# Altium footprint library ESP32-S31 CB V1.1.PcbLib: 28 footprints (part 1 of 2)
Each footprint in its own frame and in the unit in brackets; x right, y up, seen from the top. Pads: shape width x height; smd on the part's side, far side on the other; paste and mask are expansions set on the pad; w line width, h text height; cw(c..) or ccw(c..) is an arc to the next point about the centre after c.
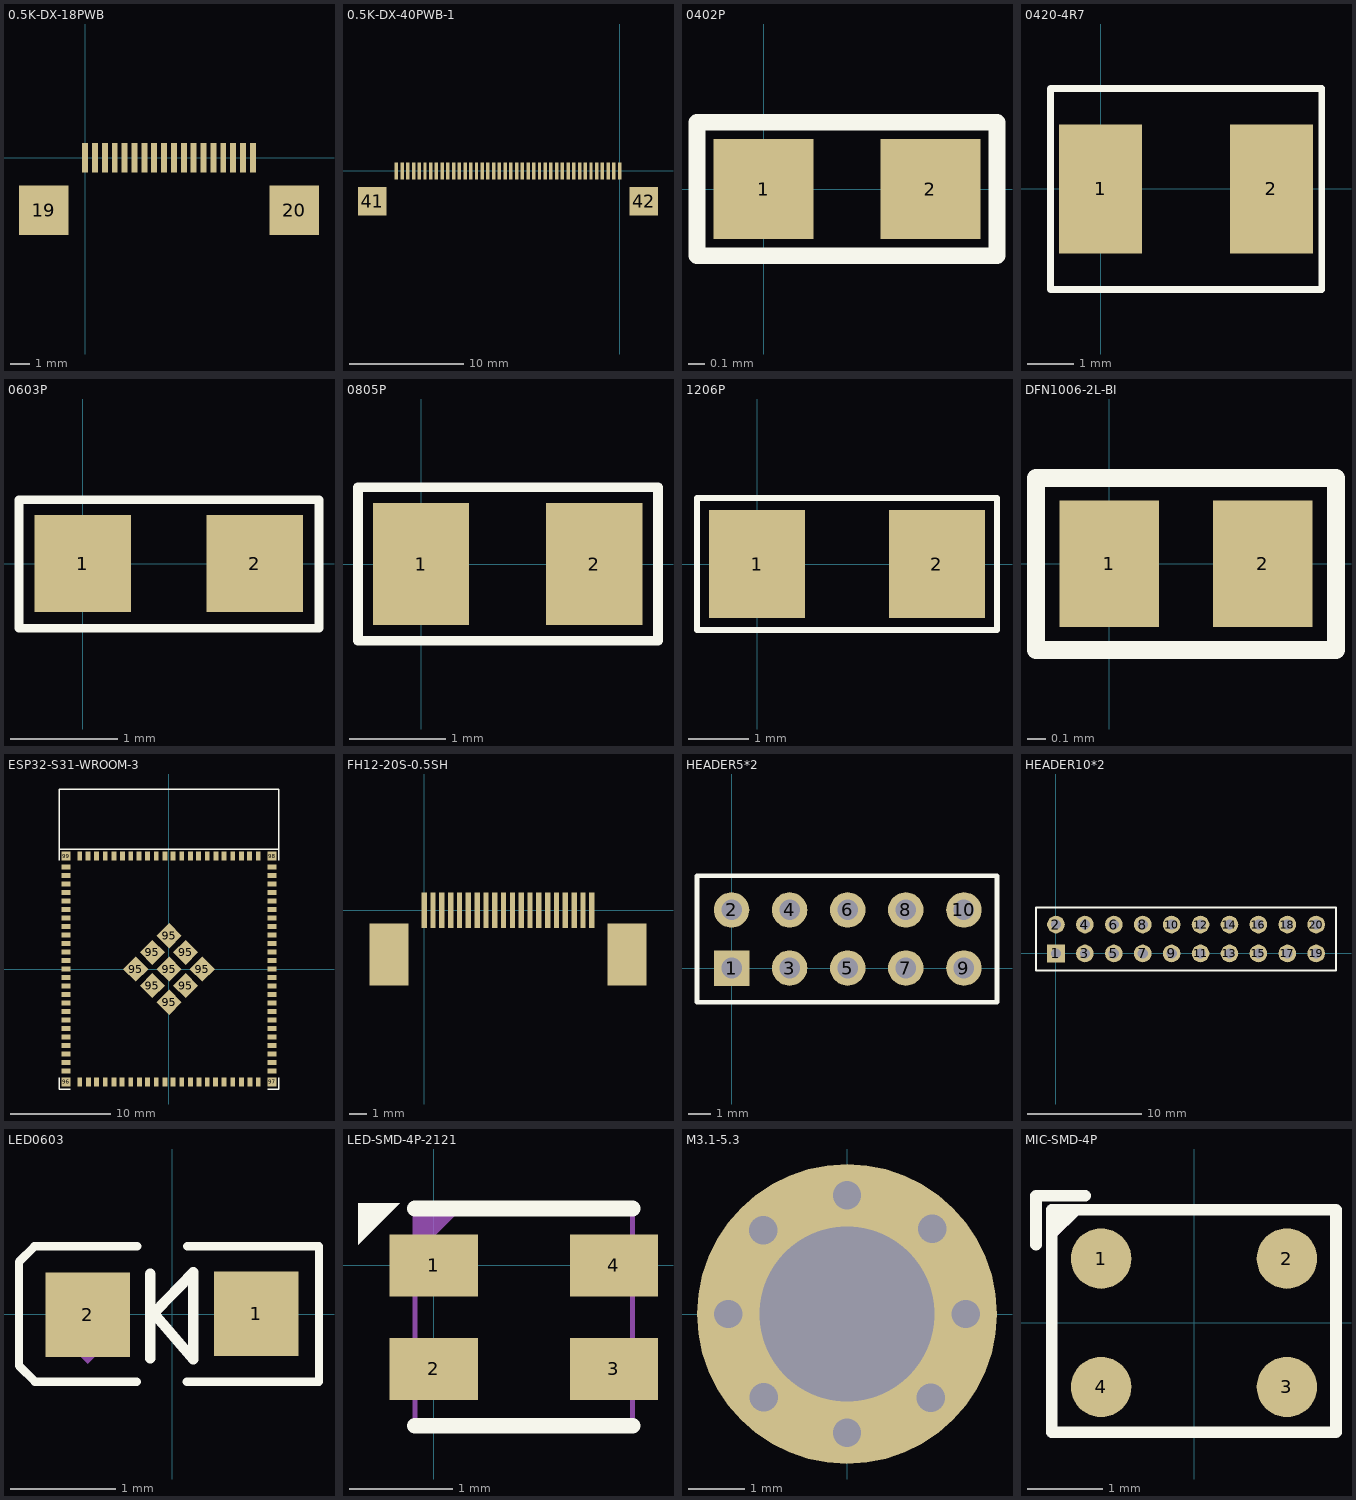
[diagram p0: the footprints below, top view; thin cyan lines are the x and y axes]

## 0.5K-DX-18PWB [mm]
pads (20):
  rect 0.3x1.5 smd: 1(0,0) 2(0.5,0) 3(1,0) 4(1.5,0) 5(2,0) 6(2.5,0) 7(3,0) 8(3.5,0) 9(4,0) 10(4.5,0) 11(5,0) 12(5.5,0) 13(6,0) 14(6.5,0) 15(7,0) 16(7.5,0) 17(8,0) 18(8.5,0)
  rect 2.5x2.5 smd: 19(-2.1,-2.65) 20(10.6,-2.65)

## 0.5K-DX-40PWB-1 [mm]
pads (42):
  rect 0.3x1.5 smd: 1(0,0) 2(-0.5,0) 3(-1,0) 4(-1.5,0) 5(-2,0) 6(-2.5,0) 7(-3,0) 8(-3.5,0) 9(-4,0) 10(-4.5,0) 11(-5,0) 12(-5.5,0) 13(-6,0) 14(-6.5,0) 15(-7,0) 16(-7.5,0) 17(-8,0) 18(-8.5,0) 19(-9,0) 20(-9.5,0) 21(-10,0) 22(-10.5,0) 23(-11,0) 24(-11.5,0) 25(-12,0) 26(-12.5,0) 27(-13,0) 28(-13.5,0) 29(-14,0) 30(-14.5,0) 31(-15,0) 32(-15.5,0) 33(-16,0) 34(-16.5,0) 35(-17,0) 36(-17.5,0) 37(-18,0) 38(-18.5,0) 39(-19,0) 40(-19.5,0)
  rect 2.5x2.5 smd: 41(-21.6,-2.65) 42(2.1,-2.65)

## 0402P [mm]
pads (2):
  rect 0.6x0.6 smd: 1(0,0) 2(1,0)
Top Overlay:
  lines w0.1: -0.4,-0.4 -0.4,0.4 1.4,0.4 1.4,-0.4 -0.4,-0.4

## 0420-4R7 [mm]
pads (2):
  rect 1.8x2.8 smd: 1(0,0) 2(3.7,0)
Top Overlay:
  lines w0.15: -1.09,-2.175 -1.09,2.174 4.792,2.174 4.792,-2.175 -1.09,-2.175

## 0603P [mm]
pads (2):
  rect 0.9x0.9 smd: 1(0,0) 2(1.6,0)
Top Overlay:
  lines w0.08: -0.596,-0.603 2.199,-0.603 2.199,0.595 -0.596,0.595 -0.596,-0.603

## 0805P [mm]
pads (2):
  rect 1x1.27 smd: 1(0,0) 2(1.8,0)
Top Overlay:
  lines w0.1: -0.656,-0.798 -0.656,0.802 2.463,0.802 2.463,-0.798 -0.656,-0.798

## 1206P [mm]
pads (2):
  rect 1.6x1.8 smd: 1(0,0) 2(3,0)
Top Overlay:
  lines w0.1: -1,-1.1 -1,1.1 4,1.1 4,-1.1 -1,-1.1

## DFN1006-2L-BI [mm]
pads (2):
  rect 0.55x0.7 smd: 1(0,0) 2(0.85,0)
Top Overlay:
  lines w0.1: -0.355,-0.479 -0.34,-0.479 ; -0.34,-0.479 -0.406,-0.479 -0.406,-0.13 -0.406,0.476 -0.355,0.476 0.802,0.476 1.1,0.476 1.255,0.476 1.255,-0.016 1.255,-0.479 1.1,-0.479 0.924,-0.479 -0.34,-0.479

## ESP32-S31-WROOM-3 [mm]
pads (107):
  rect 0.9x0.5 smd: 1(-10.3,10.2) 2(-10.3,9.35) 3(-10.3,8.5) 4(-10.3,7.65) 5(-10.3,6.8) 6(-10.3,5.95) 7(-10.3,5.1) 8(-10.3,4.25) 9(-10.3,3.4) 10(-10.3,2.55) 11(-10.3,1.7) 12(-10.3,0.85) 13(-10.3,0) 14(-10.3,-0.85) 15(-10.3,-1.7) 16(-10.3,-2.55) 17(-10.3,-3.4) 18(-10.3,-4.25) 19(-10.3,-5.1) 20(-10.3,-5.95) 21(-10.3,-6.8) 22(-10.3,-7.65) 23(-10.3,-8.5) 24(-10.3,-9.35) 25(-10.3,-10.2) 48(10.3,-10.2) 49(10.3,-9.35) 50(10.3,-8.5) 51(10.3,-7.65) 52(10.3,-6.8) 53(10.3,-5.95) 54(10.3,-5.1) 55(10.3,-4.25) 56(10.3,-3.4) 57(10.3,-2.55) 58(10.3,-1.7) 59(10.3,-0.85) 60(10.3,0) 61(10.3,0.85) 62(10.3,1.7) 63(10.3,2.55) 64(10.3,3.4) 65(10.3,4.25) 66(10.3,5.1) 67(10.3,5.95) 68(10.3,6.8) 69(10.3,7.65) 70(10.3,8.5) 71(10.3,9.35) 72(10.3,10.2)
  rect 0.5x0.9 smd: 26(-8.925,-11.3) 27(-8.075,-11.3) 28(-7.225,-11.3) 29(-6.375,-11.3) 30(-5.525,-11.3) 31(-4.675,-11.3) 32(-3.825,-11.3) 33(-2.975,-11.3) 34(-2.125,-11.3) 35(-1.275,-11.3) 36(-0.425,-11.3) 37(0.425,-11.3) 38(1.275,-11.3) 39(2.125,-11.3) 40(2.975,-11.3) 41(3.825,-11.3) 42(4.675,-11.3) 43(5.525,-11.3) 44(6.375,-11.3) 45(7.225,-11.3) 46(8.075,-11.3) 47(8.925,-11.3) 73(8.925,11.3) 74(8.075,11.3) 75(7.225,11.3) 76(6.375,11.3) 77(5.525,11.3) 78(4.675,11.3) 79(3.825,11.3) 80(2.975,11.3) 81(2.125,11.3) 82(1.275,11.3) 83(0.425,11.3) 84(-0.425,11.3) 85(-1.275,11.3) 86(-2.125,11.3) 87(-2.975,11.3) 88(-3.825,11.3) 89(-4.675,11.3) 90(-5.525,11.3) 91(-6.375,11.3) 92(-7.225,11.3) 93(-8.075,11.3) 94(-8.925,11.3)
  rrect0% 1.8x1.8 smd rot 45: 95(-3.32,0) 95(-1.66,-1.66) 95(-1.66,1.66) 95(0,-3.32) 95(0,0) 95(0,3.32) 95(1.66,-1.66) 95(1.66,1.66) 95(3.32,0)
  rect 0.9x0.9 smd: 96(-10.3,-11.3) 97(10.3,-11.3) 98(10.3,11.3) 99(-10.3,11.3)
Top Overlay:
  lines w0.127: -11,-10.9 -11,-12 -9.9,-12 ; -11,10.9 -11,12 ; -9.9,12 -11,12 ; 9.9,-12 11,-12 11,-10.9 ; 9.9,12 11,12 ; 11,10.9 11,12 ; -11,12 11,12 ; -11,12 -11,18 11,18 11,12

## FH12-20S-0.5SH [mm]
pads (22):
  rect 0.3x2 smd: 1(0,0) 2(0.5,0) 3(1,0) 4(1.5,0) 5(2,0) 6(2.5,0) 7(3,0) 8(3.5,0) 9(4,0) 10(4.5,0) 11(5,0) 12(5.5,0) 13(6,0) 14(6.5,0) 15(7,0) 16(7.5,0) 17(8,0) 18(8.5,0) 19(9,0) 20(9.5,0)
  rect 2.2x3.5 smd: ""(-2,-2.5) ""(11.5,-2.5)

## HEADER5*2 [mm]
pads (10):
  rect 1.55x1.55 hole 0.9: 1(0,0)
  round 1.55 hole 0.9: 2(0,2.54) 3(2.54,0) 4(2.54,2.54) 5(5.08,0) 6(5.08,2.54) 7(7.62,0) 8(7.62,2.54) 9(10.16,0) 10(10.16,2.54)
Top Overlay:
  lines w0.2: -1.511,-1.5 11.608,-1.5 11.608,4.04 -1.511,4.04 -1.511,-1.5

## HEADER10*2 [mm]
pads (20):
  rect 1.55x1.55 hole 0.9: 1(0,0)
  round 1.55 hole 0.9: 2(0,2.54) 3(2.54,0) 4(2.54,2.54) 5(5.08,0) 6(5.08,2.54) 7(7.62,0) 8(7.62,2.54) 9(10.16,0) 10(10.16,2.54) 11(12.7,0) 12(12.7,2.54) 13(15.24,0) 14(15.24,2.54) 15(17.78,0) 16(17.78,2.54) 17(20.32,0) 18(20.32,2.54) 19(22.86,0) 20(22.86,2.54)
Top Overlay:
  lines w0.2: -1.756,-1.5 24.599,-1.5 24.599,4.04 -1.756,4.04 -1.756,-1.5

## LED0603 [mil]
pads (2):
  rect 31.5x31.5 smd: 1(31.45,0.15) 2(-31.45,-0.15)
Top Overlay:
  lines w3.15: -13.22,-25.11 -51.09,-25.11 -57.03,-19.17 -57.03,19.57 -51.29,25.31 -12.99,25.31 ; 5.52,-25.11 54.75,-25.11 54.75,25.31 5.63,25.31
  lines w3.94: -8.18,-16.42 -8.18,15.01 ; -6.88,0.45 7.97,15.59 7.97,-16.78 -6.88,0.45
Mechanical 8:
  region: -31.45,-18.45 -34.05,-15.85 -33.29,-14.01 -31.45,-13.25 -29.61,-14.01 -28.85,-15.85

## LED-SMD-4P-2121 [mil]
pads (4):
  rect 33.5x23.6 smd: 1(0,0) 2(0,-39.4) 3(68.5,-39.4) 4(68.5,0)
Top Overlay:
  region: -13,23.6 -28.8,23.6 -28.8,7.9
  lines w6: -7.1,-61 75.6,-61 ; -7.1,21.6 75.6,21.6
Mechanical 2:
  region: -7.1,21.6 10.6,21.6 -7.1,3.9
  region: 61.1,-6.1 59.8,-4.1 59.8,3.9 61.9,3.9 61.8,-5.5
  region: 61.1,-6.1 56.8,-6.1 54.7,-5.4 53.4,-3.9 52.2,-0.9 52.3,2.2 53.4,5.1 54.9,6.5 56.9,7.3 60.9,7.2 61.5,7 62,6.4 61.9,3.8 59.9,3.9 59.9,5.2 57.1,5.2 55.3,4.1 54.3,2 54.2,-0.6 55.3,-3.2 56,-3.8 57.2,-4.1 59.9,-4
  region: 72.3,-6 71.5,-6 65.4,2.8 65.3,-5.5 64.4,-6.1 64,-6 63.6,-5.7 63.3,-5.1 63.3,6.3 63.6,6.8 64.1,7.2 64.8,7.2 65.3,6.9 70.9,-1.6 70.8,6.1 71,6.9 71.4,7.2 72.2,7.2 72.7,6.8 72.9,6.4 72.9,-5 72.7,-5.7
  region: 74.5,-2.7 75.1,-4 76.5,-5.3 77.9,-6 80.6,-6.1 82,-5.3 83.2,-4 84,-2.6 84.5,-0.9 84.5,2 83.8,4 83.1,5.3 82,6.5 80.5,7.2 77.9,7.2 76.3,6.3 75.1,5.2 74.4,3.6 74.5,1.6 74.9,1.1 75.7,1 78.2,0.9 78.8,1.2 79,1.6 79,1.9 78.9,2.1 79,2.3 78.9,2.4 78.3,2.9 77.1,3 76.5,2.9 76.4,3.2 76.8,3.9 77.3,4.5 78.7,5.3 80.1,5.2 81.3,4.3 82.5,1.9 82.4,-0.7 81.6,-3 80.1,-4.1 77.6,-3.8 76.9,-2.8 76.1,-1.7 75.5,-1.4 74.9,-1.6 74.6,-1.9
Mechanical 6:
  lines w2: -7.1,-61 -7.1,21.6 75.6,21.6 75.6,-61 -7.1,-61
Mechanical 8:
  region: -9.5,21.6 -9.1,22.9 -8.1,23.8 -6.8,24 -5.6,23.4 -4.9,22.3 -4.9,21 -5.6,19.9 -6.8,19.3 -8.1,19.5 -9.1,20.4
Mechanical 9:
  region: -7.1,9.8 16.5,9.8 16.5,-9.9 -7.1,-9.9
  region: 51.9,9.8 75.6,9.8 75.6,-9.9 51.9,-9.9
  region: 51.9,-29.5 75.6,-29.5 75.6,-49.2 51.9,-49.2
  region: -7.1,-29.5 16.5,-29.5 16.5,-49.2 -7.1,-49.2

## M3.1-5.3 [mm]
pads (9):
  round 0.5 hole 0.5: ""(-2.1,0) ""(-1.48,1.48) ""(-1.473,-1.473) ""(0,-2.1) ""(0,2.1) ""(1.48,-1.48) ""(1.506,1.506) ""(2.1,0)
  round 5.3 hole 3.1: ""(0,0)

## MIC-SMD-4P [mm]
pads (4):
  round 0.8 smd: 1(-1.23,0.85) 2(1.23,0.85) 3(1.23,-0.85) 4(-1.23,-0.85)
Top Overlay:
  region: -1.88,1.498 -1.88,1.076 -1.456,1.498
  lines w0.152: -2.091,1.03 -2.091,1.683 -1.438,1.683 ; -1.88,-1.451 -1.88,1.498 1.879,1.498 1.879,-1.451 -1.88,-1.451
Mechanical 2:
  region: -1.88,1.498 -1.88,1.076 -1.456,1.498
Mechanical 6:
  lines w0.051: -1.88,-1.451 -1.88,1.498 1.879,1.498 1.879,-1.451 -1.88,-1.451
Mechanical 8:
  region: -1.786,1.444 -1.74,1.425 -1.72,1.378 -1.74,1.332 -1.786,1.312 -1.786,1.444 -1.74,1.425 -1.72,1.378 -1.74,1.332 -1.786,1.312